# Altium footprint library Amin-Library.PcbLib: 601 footprints (part 32 of 38)
Each footprint in its own frame and in the unit in brackets; x right, y up, seen from the top. Pads: shape width x height; smd on the part's side, far side on the other; paste and mask are expansions set on the pad; w line width, h text height; cw(c..) or ccw(c..) is an arc to the next point about the centre after c.
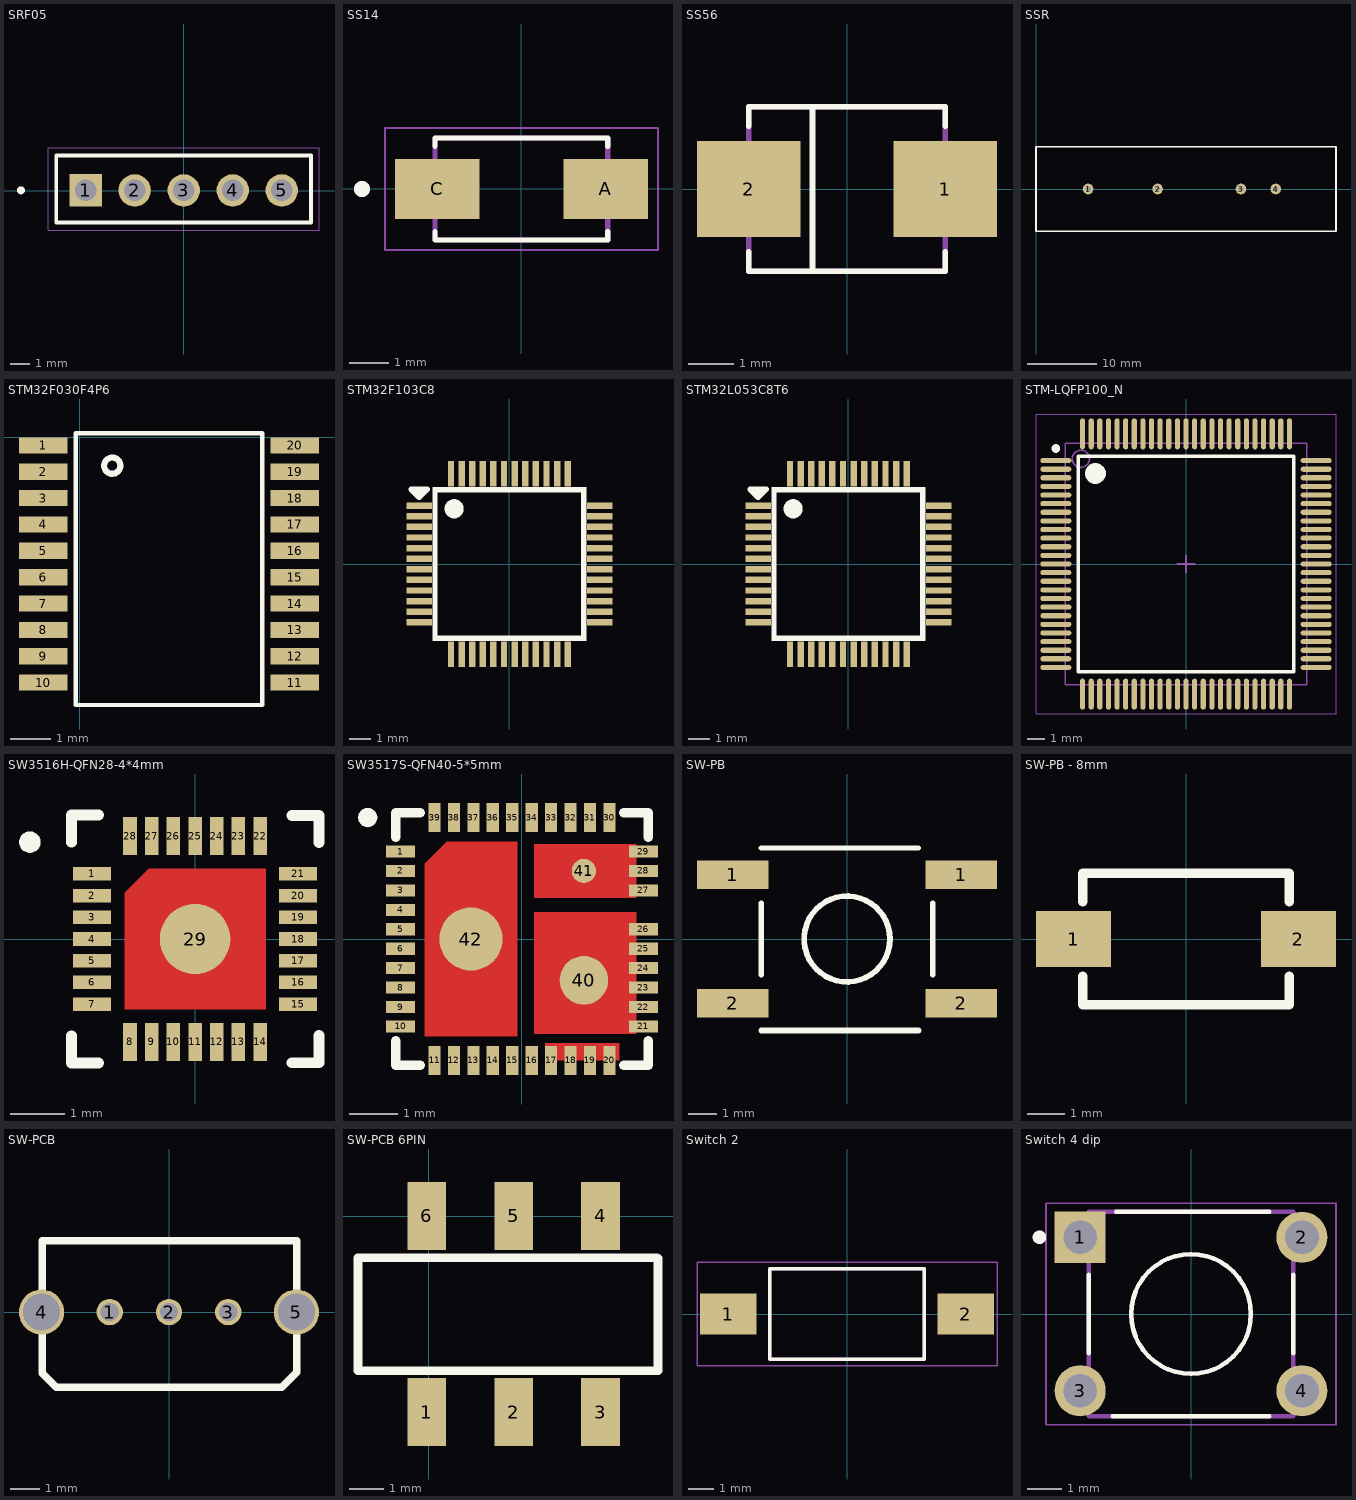
[diagram p31: the footprints below, top view; thin cyan lines are the x and y axes]

## SRF05 [mm]
pads (5):
  rect 1.65x1.65 hole 1.1: 1(-5,0.03)
  round 1.65 hole 1.1: 2(-2.5,0.03) 3(0,0.03) 4(2.5,0.03) 5(5,0.03)
Top Overlay:
  circle w0.2: c-8.302,0.03 r0.1
  lines w0.2: -6.5,-1.6 -6.5,1.8 6.5,1.8 6.5,-1.6 -6.5,-1.6
Mechanical 13:
  lines w0.1: -6.5,-1.6 6.5,-1.6 6.5,1.8 -6.5,1.8 -6.5,-1.6
Mechanical 15:
  lines w0.05: -6.9,-2 6.9,-2 6.9,2.2 -6.9,2.2 -6.9,-2
3D body "SRF05 …ðâ!W.SLDPRT": height 5.25, standoff -20.98, extent -22.5,-17.62 22.5,0.03

## SS14 [mm]
pads (2):
  rect 2.12x1.5 smd: A(2.115,0) C(-2.115,0)
Top Overlay:
  circle w0.2: c-4,0 r0.1
  lines w0.127: -2.165,-1.07 -2.165,-1.28 2.165,-1.28 2.165,-1.07 ; -2.165,1.07 -2.165,1.28 2.165,1.28 2.165,1.07
Mechanical 13:
  circle w0.2: c-4,0 r0.1
  lines w0.127: -2.165,-1.28 2.165,-1.28 2.165,1.28 -2.165,1.28 -2.165,-1.28
Mechanical 15:
  lines w0.05: -3.425,-1.53 3.425,-1.53 3.425,1.53 -3.425,1.53 -3.425,-1.53
3D body "SS14.STEP": height 2.5, standoff 0, extent -2.697,-1.28 2.443,1.28

## SS56 [mm] "SMB"
height 2.65
pads (2):
  rect 2.28x2.12 smd: 1(2.165,0) 2(-2.165,0)
Top Overlay:
  lines w0.127: -2.163,-1.38 -2.163,-1.813 2.163,-1.813 2.163,-1.38 ; -2.163,1.38 -2.163,1.813 2.163,1.813 2.163,1.38 ; -0.762,-1.813 -0.762,1.813
Mechanical 13:
  lines w0.127: -2.163,-1.813 -2.163,1.813 2.163,1.813 2.163,-1.813 -2.163,-1.813
3D body "step_temp.STEP": height 2.65, standoff 0, extent -2.67,-1.813 2.67,1.813

## SSR [mil] "HHG1D-1"
pads (4):
  round 60 hole 30: 1(295.28,0) 2(688.98,0) 3(1161.42,0) 4(1358.27,0)
Top Overlay:
  lines w10: 0,-240 0,0 0,240 1700,240 1700,-240 0,-240

## STM32F030F4P6 [mm]
pads (20):
  rect 1.2x0.4 smd: 1(-0.9,-0.2) 2(-0.9,-0.85) 3(-0.9,-1.5) 4(-0.9,-2.15) 5(-0.9,-2.8) 6(-0.9,-3.45) 7(-0.9,-4.1) 8(-0.9,-4.75) 9(-0.9,-5.4) 10(-0.9,-6.05) 11(5.3,-6.05) 12(5.3,-5.4) 13(5.3,-4.75) 14(5.3,-4.1) 15(5.3,-3.45) 16(5.3,-2.8) 17(5.3,-2.15) 18(5.3,-1.5) 19(5.3,-0.85) 20(5.3,-0.2)
Top Overlay:
  circle w0.15: c0.8,-0.7 r0.2
  lines w0.1: -0.1,-6.6 -0.1,0.1 4.5,0.1 4.5,-6.6 -0.1,-6.6
3D body "STM32F030F4P6.STEP": height 1.1, standoff -0.09, extent -0.94,-6.5 5.34,0

## STM32F103C8 [mm]
height 5.33
pads (48):
  rect 1.2x0.3 smd mask+0.051: 1(-4.25,2.75) 2(-4.25,2.25) 3(-4.25,1.75) 4(-4.25,1.25) 5(-4.25,0.75) 6(-4.25,0.25) 7(-4.25,-0.25) 8(-4.25,-0.75) 9(-4.25,-1.25) 10(-4.25,-1.75) 11(-4.25,-2.25) 12(-4.25,-2.75) 25(4.25,-2.75) 26(4.25,-2.25) 27(4.25,-1.75) 28(4.25,-1.25) 29(4.25,-0.75) 30(4.25,-0.25) 31(4.25,0.25) 32(4.25,0.75) 33(4.25,1.25) 34(4.25,1.75) 35(4.25,2.25) 36(4.25,2.75)
  rect 0.3x1.2 smd mask+0.051: 13(-2.75,-4.25) 14(-2.25,-4.25) 15(-1.75,-4.25) 16(-1.25,-4.25) 17(-0.75,-4.25) 18(-0.25,-4.25) 19(0.25,-4.25) 20(0.75,-4.25) 21(1.25,-4.25) 22(1.75,-4.25) 23(2.25,-4.25) 24(2.75,-4.25) 37(2.75,4.25) 38(2.25,4.25) 39(1.75,4.25) 40(1.25,4.25) 41(0.75,4.25) 42(0.25,4.25) 43(-0.25,4.25) 44(-0.75,4.25) 45(-1.25,4.25) 46(-1.75,4.25) 47(-2.25,4.25) 48(-2.75,4.25)
Top Overlay:
  circle w0.6: c-2.6,2.6 r0.15
  rectangle: -3.175,3.373 3.627,3.627
  region: 3.627,2.992 3.627,3.627 3.373,3.627 3.373,2.992
  region: -3.373,-3.627 -3.373,3.627 -3.627,3.627 -3.627,-3.627
  region: -2.992,3.627 -3.627,3.627 -3.627,3.373 -2.992,3.373
  region: -3.627,-2.992 -3.627,-3.627 -3.373,-3.627 -3.373,-2.992
  region: -2.992,-3.373 -3.627,-3.373 -3.627,-3.627 -2.992,-3.627
  region: 3.373,3.373 3.373,-3.627 3.627,-3.627 3.627,3.373
  rectangle: -3.373,-3.627 3.627,-3.373
  region: -4.25,3.131 -3.869,3.512 -4.631,3.512
  lines w0.254: -3.5,-3.119 -3.5,-3.5 -3.119,-3.5 ; -3.5,3.119 -3.5,3.5 -3.119,3.5 ; 3.119,-3.5 3.5,-3.5 3.5,-3.119 ; 3.119,3.5 3.5,3.5 3.5,3.119 ; -4.631,3.512 -4.25,3.512 -3.869,3.512 -4.25,3.131 -4.631,3.512
3D body "LQFP48.STEP": height 1.5, standoff 0, extent -4.5,-4.5 4.5,4.5

## STM32L053C8T6 [mm]
height 5.33
pads (48):
  rect 1.2x0.3 smd mask+0.051: 1(-4.25,2.75) 2(-4.25,2.25) 3(-4.25,1.75) 4(-4.25,1.25) 5(-4.25,0.75) 6(-4.25,0.25) 7(-4.25,-0.25) 8(-4.25,-0.75) 9(-4.25,-1.25) 10(-4.25,-1.75) 11(-4.25,-2.25) 12(-4.25,-2.75) 25(4.25,-2.75) 26(4.25,-2.25) 27(4.25,-1.75) 28(4.25,-1.25) 29(4.25,-0.75) 30(4.25,-0.25) 31(4.25,0.25) 32(4.25,0.75) 33(4.25,1.25) 34(4.25,1.75) 35(4.25,2.25) 36(4.25,2.75)
  rect 0.3x1.2 smd mask+0.051: 13(-2.75,-4.25) 14(-2.25,-4.25) 15(-1.75,-4.25) 16(-1.25,-4.25) 17(-0.75,-4.25) 18(-0.25,-4.25) 19(0.25,-4.25) 20(0.75,-4.25) 21(1.25,-4.25) 22(1.75,-4.25) 23(2.25,-4.25) 24(2.75,-4.25) 37(2.75,4.25) 38(2.25,4.25) 39(1.75,4.25) 40(1.25,4.25) 41(0.75,4.25) 42(0.25,4.25) 43(-0.25,4.25) 44(-0.75,4.25) 45(-1.25,4.25) 46(-1.75,4.25) 47(-2.25,4.25) 48(-2.75,4.25)
Top Overlay:
  circle w0.6: c-2.6,2.6 r0.15
  rectangle: -3.373,-3.627 3.627,-3.373
  region: 3.373,3.373 3.373,-3.627 3.627,-3.627 3.627,3.373
  region: -2.992,-3.373 -3.627,-3.373 -3.627,-3.627 -2.992,-3.627
  region: -3.627,-2.992 -3.627,-3.627 -3.373,-3.627 -3.373,-2.992
  region: -2.992,3.627 -3.627,3.627 -3.627,3.373 -2.992,3.373
  region: -3.373,-3.627 -3.373,3.627 -3.627,3.627 -3.627,-3.627
  region: 3.627,2.992 3.627,3.627 3.373,3.627 3.373,2.992
  rectangle: -3.175,3.373 3.627,3.627
  region: -4.25,3.131 -3.869,3.512 -4.631,3.512
  lines w0.254: -3.5,-3.119 -3.5,-3.5 -3.119,-3.5 ; -3.5,3.119 -3.5,3.5 -3.119,3.5 ; 3.119,-3.5 3.5,-3.5 3.5,-3.119 ; 3.119,3.5 3.5,3.5 3.5,3.119 ; -4.631,3.512 -4.25,3.131 -3.869,3.512 -4.25,3.512 -4.631,3.512
3D body "LQFP48.STEP": height 1.5, standoff 0, extent -4.5,-4.5 4.5,4.5

## STM-LQFP100_N [mm] "Thin QFP, 100-Leads, Body 14x14mm, Pitch 0.5mm, IPC Medium Density"
height 1.6
pads (100):
  oval 1.8x0.3 smd: 1(-7.55,6) 2(-7.55,5.5) 3(-7.55,5) 4(-7.55,4.5) 5(-7.55,4) 6(-7.55,3.5) 7(-7.55,3) 8(-7.55,2.5) 9(-7.55,2) 10(-7.55,1.5) 11(-7.55,1) 12(-7.55,0.5) 13(-7.55,0) 14(-7.55,-0.5) 15(-7.55,-1) 16(-7.55,-1.5) 17(-7.55,-2) 18(-7.55,-2.5) 19(-7.55,-3) 20(-7.55,-3.5) 21(-7.55,-4) 22(-7.55,-4.5) 23(-7.55,-5) 24(-7.55,-5.5) 25(-7.55,-6) 51(7.55,-6) 52(7.55,-5.5) 53(7.55,-5) 54(7.55,-4.5) 55(7.55,-4) 56(7.55,-3.5) 57(7.55,-3) 58(7.55,-2.5) 59(7.55,-2) 60(7.55,-1.5) 61(7.55,-1) 62(7.55,-0.5) 63(7.55,0) 64(7.55,0.5) 65(7.55,1) 66(7.55,1.5) 67(7.55,2) 68(7.55,2.5) 69(7.55,3) 70(7.55,3.5) 71(7.55,4) 72(7.55,4.5) 73(7.55,5) 74(7.55,5.5) 75(7.55,6)
  oval 0.3x1.8 smd: 26(-6,-7.55) 27(-5.5,-7.55) 28(-5,-7.55) 29(-4.5,-7.55) 30(-4,-7.55) 31(-3.5,-7.55) 32(-3,-7.55) 33(-2.5,-7.55) 34(-2,-7.55) 35(-1.5,-7.55) 36(-1,-7.55) 37(-0.5,-7.55) 38(0,-7.55) 39(0.5,-7.55) 40(1,-7.55) 41(1.5,-7.55) 42(2,-7.55) 43(2.5,-7.55) 44(3,-7.55) 45(3.5,-7.55) 46(4,-7.55) 47(4.5,-7.55) 48(5,-7.55) 49(5.5,-7.55) 50(6,-7.55) 76(6,7.55) 77(5.5,7.55) 78(5,7.55) 79(4.5,7.55) 80(4,7.55) 81(3.5,7.55) 82(3,7.55) 83(2.5,7.55) 84(2,7.55) 85(1.5,7.55) 86(1,7.55) 87(0.5,7.55) 88(0,7.55) 89(-0.5,7.55) 90(-1,7.55) 91(-1.5,7.55) 92(-2,7.55) 93(-2.5,7.55) 94(-3,7.55) 95(-3.5,7.55) 96(-4,7.55) 97(-4.5,7.55) 98(-5,7.55) 99(-5.5,7.55) 100(-6,7.55)
Top Overlay:
  circle w0.25: c-7.55,6.7 r0.125
  circle w0.6: c-5.25,5.25 r0.3
  lines w0.2: -6.25,-6.25 -6.25,6.25 6.25,6.25 6.25,-6.25 -6.25,-6.25
Mechanical 13:
  circle w0.1: c-6.1,6.1 r0.5
  lines w0.1: -7,-7 -7,7 7,7 7,-7 -7,-7
Mechanical 15:
  lines w0.05: -8.7,-8.7 -8.7,8.7 8.7,8.7 8.7,-8.7 -8.7,-8.7
  lines w0.1: -0.5,0 0.5,0 ; 0,-0.5 0,0.5
3D body "User Library-LQFP-100-11.STEP": height 1.5, standoff 0, extent -8,-8 8,8

## SW3516H-QFN28-4*4mm [mm]
pads (30):
  rect 0.7x0.25 smd mask+0.03: 1(-1.9,1.2) 2(-1.9,0.8) 3(-1.9,0.4) 4(-1.9,0) 5(-1.9,-0.4) 6(-1.9,-0.8) 7(-1.9,-1.2) 15(1.9,-1.2) 16(1.9,-0.8) 17(1.9,-0.4) 18(1.9,0) 19(1.9,0.4) 20(1.9,0.8) 21(1.9,1.2)
  rect 0.25x0.7 smd mask+0.03: 8(-1.2,-1.9) 9(-0.8,-1.9) 10(-0.4,-1.9) 11(0,-1.9) 12(0.4,-1.9) 13(0.8,-1.9) 14(1.2,-1.9) 22(1.2,1.9) 23(0.8,1.9) 24(0.4,1.9) 25(0,1.9) 26(-0.4,1.9) 27(-0.8,1.9) 28(-1.2,1.9)
  round 1.3 smd paste-2: 29(0,0)
  round 0.4 on Top Overlay: ""(-3.048,1.786)
Top Layer:
  region: -0.85,1.3 -1.3,0.85 -1.3,-1.3 1.3,-1.3 1.3,1.3
Top Overlay:
  lines w0.2: -2.282,-1.786 -2.282,-2.286 -1.782,-2.286 ; -2.282,1.786 -2.282,2.286 -1.782,2.286 ; 1.786,-2.282 2.286,-2.282 2.286,-1.782 ; 1.786,2.278 2.286,2.278 2.286,1.778
Top Paste:
  rectangle: 0.225,-0.95 0.975,-0.25
  rectangle: 0.225,0.225 0.975,0.975
  rectangle: -0.975,0.25 -0.225,0.95
  rectangle: -0.975,-0.95 -0.225,-0.25
3D body: height 0.75, standoff 0, extent -2,-2.05 2,2.05

## SW3517S-QFN40-5*5mm [mm]
pads (44):
  rect 0.6x0.25 smd mask+0.03: 1(-2.5,1.8) 2(-2.5,1.4) 3(-2.5,1) 4(-2.5,0.6) 5(-2.5,0.2) 6(-2.5,-0.2) 7(-2.5,-0.6) 8(-2.5,-1) 9(-2.5,-1.4) 10(-2.5,-1.8) 21(2.5,-1.8) 22(2.5,-1.4) 23(2.5,-1) 24(2.5,-0.6) 25(2.5,-0.2) 26(2.5,0.2) 27(2.5,1) 28(2.5,1.4) 29(2.5,1.8)
  rect 0.25x0.6 smd mask+0.03: 11(-1.8,-2.5) 12(-1.4,-2.5) 13(-1,-2.5) 14(-0.6,-2.5) 15(-0.2,-2.5) 16(0.2,-2.5) 17(0.6,-2.5) 18(1,-2.5) 19(1.4,-2.5) 20(1.8,-2.5) 30(1.8,2.5) 31(1.4,2.5) 32(1,2.5) 33(0.6,2.5) 34(0.2,2.5) 35(-0.2,2.5) 36(-0.6,2.5) 37(-1,2.5) 38(-1.4,2.5) 39(-1.8,2.5)
  round 1 smd: 40(1.275,-0.85)
  round 0.5 smd: 41(1.275,1.4)
  round 1.3 smd: 42(-1.05,0)
  round 0.4 on Top Overlay: ""(-3.175,2.5) ""(-3.175,2.5)
Top Layer:
  region: 0.25,1.95 2.35,1.95 2.35,0.85 0.25,0.85
  region: -1.55,2 -2,1.55 -2,-2 -0.1,-2 -0.1,2
  region: 0.25,0.55 2.35,0.55 2.35,-1.95 0.25,-1.95
  region: 2,-2.5 0.475,-2.5 0.475,-2.15 2,-2.15
Top Overlay:
  lines w0.2: -2.6,-2.1 -2.6,-2.6 -2.1,-2.6 ; -2.6,2.1 -2.6,2.6 -2.1,2.6 ; 2.1,-2.6 2.6,-2.6 2.6,-2.1 ; 2.1,2.6 2.6,2.6 2.6,2.1
Top Paste:
  rectangle: -1.893,-1.55 -1.143,-0.85
  rectangle: -0.975,-1.55 -0.225,-0.85
  rectangle: -0.975,-0.35 -0.225,0.35
  rectangle: -1.893,-0.35 -1.143,0.35
  rectangle: -0.975,0.85 -0.225,1.55
  rectangle: -1.893,0.85 -1.143,1.55
  rectangle: 0.375,-0.35 1.125,0.35
  rectangle: 1.275,-0.35 2.025,0.35
  rectangle: 0.375,-1.55 1.125,-0.85
  rectangle: 1.275,-1.55 2.025,-0.85
  rectangle: 0.375,1.022 1.125,1.722
  rectangle: 1.275,1.022 2.025,1.722
3D body: height 0.75, standoff 0, extent -2.5,-2.5 2.5,2.5

## SW-PB [mm]
height 7.62
pads (4):
  rect 2.5x1 smd: 1(-3.992,2.25) 1(3.992,2.25) 2(-3.992,-2.25) 2(3.992,-2.25)
Top Overlay:
  circle w0.2: c0,0 r1.5
  lines w0.178: -2.997,3.175 2.503,3.175
  lines w0.2: -3,-1.25 -3,1.25 ; -2.997,-3.2 2.503,-3.2 ; 3,-1.25 3,1.25
3D body "SW3dPS-switch.STEP": height 5, standoff 0, extent -4.5,-3 4.5,3

## SW-PB - 8mm [mm]
pads (2):
  rect 2x1.5 smd: 1(-3,0) 2(3,0)
Top Overlay:
  lines w0.254: -2.75,-1 -2.75,-1.75 2.75,-1.75 2.75,-1 ; -2.75,1 -2.75,1.75 2.75,1.75 2.75,1
3D body "User Library-Tact switch 1181_3.step": height 2.51, standoff 0.01, extent -3.937,-1.822 4.063,1.778

## SW-PCB [mil] "1P2T 90 Angle Horizontal Slide"
pads (5):
  round 35 hole 24: 1(-78.75,0) 2(0,0) 3(78.75,0)
  round 60 hole 49.2: 4(-169.29,0) 5(169.29,0)
Top Overlay:
  lines w10: -168.58,-81.42 -150,-100 150,-100 170,-80 170,95 -168.58,95 -168.58,-75 -168.58,-81.42

## SW-PCB 6PIN [mil] "2P2T 6PIN"
pads (6):
  rect 44x77 smd: 1(-2,-222) 2(96.43,-222) 3(194.85,-222) 4(194.85,0.45) 5(96.43,0.45) 6(-2,0.45)
Top Overlay:
  lines w10: 257,-175 -80,-175 -80,-47 259,-47 ; 260,-175 260,-48

## Switch 2 [mm]
pads (2):
  rect 2.18x1.6 smd: 1(-4.6,0) 2(4.6,0)
Top Overlay:
  lines w0.127: -3,-1.75 -3,1.75 3,1.75 3,-1.75 -3,-1.75
Mechanical 4:
  lines w0.127: -3,-1.75 -3,1.75 ; -3,-1.75 3,-1.75 ; -3,-1.75 -3,1.75 ; -3,-1.75 3,-1.75 ; -3,1.75 3,1.75 ; -3,1.75 3,1.75 ; 3,-1.75 3,1.75 ; 3,-1.75 3,1.75
Mechanical 16:
  lines w0.05: -5.815,-2 -5.815,2 5.815,2 5.815,-2 -5.815,-2
3D body "User Library-Tact switch 1181_3.step": height 2.51, standoff 0.01, extent -4,-1.778 4,1.822

## Switch 4 dip [mm]
pads (4):
  rect 1.498x1.498 hole 0.99: 1(-3.25,2.25)
  round 1.498 hole 0.99: 2(3.25,2.25) 3(-3.25,-2.25) 4(3.25,-2.25)
Top Overlay:
  circle w0.127: c0,0 r1.755
  circle w0.2: c-4.445,2.25 r0.1
  lines w0.127: -2.995,-1.15 -2.995,1.15 ; -2.3,-2.995 2.3,-2.995 ; -2.2,2.995 2.3,2.995 ; 3,-1.15 3,1.15
Mechanical 4:
  circle w0.127: c0,0 r1.755
  circle w0.127: c0,0 r1.755
  lines w0.127: -2.995,-2.995 -2.995,2.995 ; -2.995,-2.995 2.995,-2.995 ; -2.995,-2.995 -2.995,2.995 ; -2.995,-2.995 2.995,-2.995 ; -2.995,2.995 2.995,2.995 ; -2.995,2.995 2.995,2.995 ; 2.995,-2.995 2.995,2.995 ; 2.995,-2.995 2.995,2.995
Mechanical 16:
  lines w0.05: -4.25,-3.25 -4.25,3.25 4.25,3.25 4.25,-3.25 -4.25,-3.25
3D body "User Library-diptronics tactile dts-63k.step": height 3, standoff -7.5, extent -3.95,-3.1 3.95,3.1